# Altium schematic symbol library Game_Controller.SchLib: 17 symbols
Pins are listed as number, name and electrical type; pins without a type are passive.

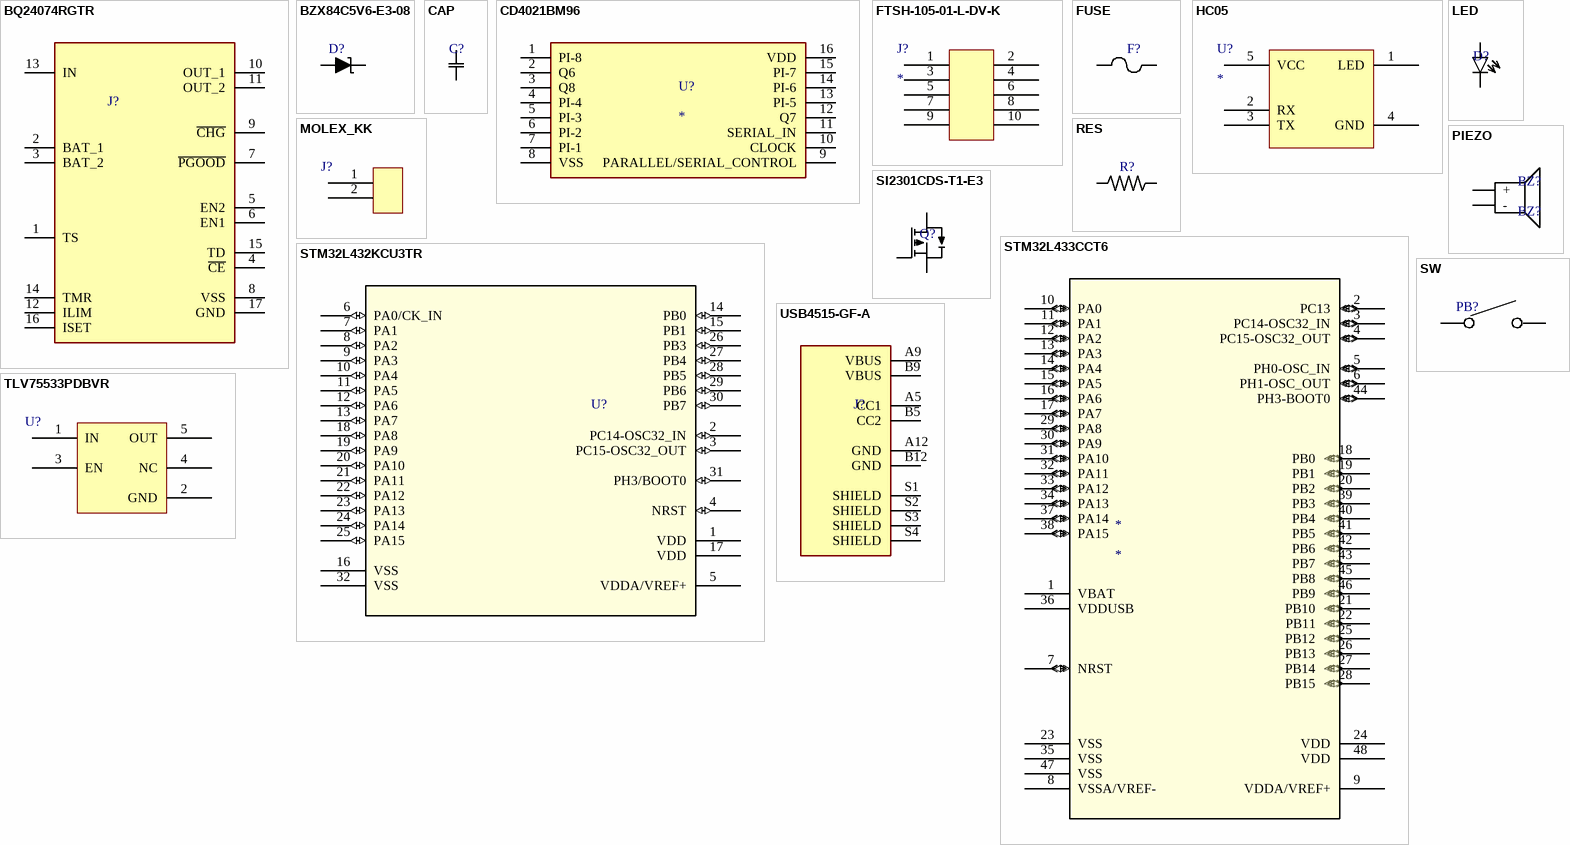
[diagram p0: symbols BQ24074RGTR to USB4515-GF-A]

## BQ24074RGTR
designator J?
footprint BQ24074RGTR
pins: 1 TS, 2 BAT_1, 3 BAT_2, 4 ~{CE}, 5 EN2, 6 EN1, 7 ~{PGOOD}, 8 VSS, 9 ~{CHG}, 10 OUT_1, 11 OUT_2, 12 ILIM, 13 IN, 14 TMR, 15 TD, 16 ISET, 17 GND

## BZX84C5V6-E3-08
designator D?
footprint SOT23-3 (SOT23, 3-Leads, Body 2.90x2.80mm, Pitch 0.95mm, IPC Medium Density)
pins: 1 A, 3 K

## CAP
designator C?
pins: 1, 2

## CD4021BM96
designator U?
footprint CD4021BM96
pins: 1 PI-8, 2 Q6, 3 Q8, 4 PI-4, 5 PI-3, 6 PI-2, 7 PI-1, 8 VSS, 9 PARALLEL/SERIAL_CONTROL, 10 CLOCK, 11 SERIAL_IN, 12 Q7, 13 PI-5, 14 PI-6, 15 PI-7, 16 VDD

## FTSH-105-01-L-DV-K
designator J?
pins: 1, 2, 3, 4, 5, 6, 7, 8, 9, 10

## FUSE
designator F?
pins: 1, 2

## HC05
designator U?
pins: 1 LED, 2 RX, 3 TX, 4 GND, 5 VCC

## LED
designator D?
pins: 1 A, 2 K

## MOLEX_KK
designator J?
pins: 1, 2

## PIEZO
designator BZ?, comment BZ?
pins: 1 +, 2 -

## RES
designator R?
pins: 1, 2

## SI2301CDS-T1-E3
designator Q?
footprint SOT23-3 (SOT23, 3-Leads, Body 2.90x2.80mm, Pitch 0.95mm, IPC Medium Density)
pins: 1 G, 2 S, 3 D

## STM32L432KCU3TR
designator U?
pins: 1 VDD (power), 2 PC14-OSC32_IN (io), 3 PC15-OSC32_OUT (io), 4 NRST (io), 5 VDDA/VREF+ (power), 6 PA0/CK_IN (io), 7 PA1 (io), 8 PA2 (io), 9 PA3 (io), 10 PA4 (io), 11 PA5 (io), 12 PA6 (io), 13 PA7 (io), 14 PB0 (io), 15 PB1 (io), 16 VSS (power), 17 VDD (power), 18 PA8 (io), 19 PA9 (io), 20 PA10 (io), 21 PA11 (io), 22 PA12 (io), 23 PA13 (io), 24 PA14 (io), 25 PA15 (io), 26 PB3 (io), 27 PB4 (io), 28 PB5 (io), 29 PB6 (io), 30 PB7 (io), 31 PH3/BOOT0 (io), 32 VSS (power)

## STM32L433CCT6
designator *
pins: 1 VBAT (power), 2 PC13 (io), 3 PC14-OSC32_IN (io), 4 PC15-OSC32_OUT (io), 5 PH0-OSC_IN (io), 6 PH1-OSC_OUT (io), 7 NRST (io), 8 VSSA/VREF- (power), 9 VDDA/VREF+ (power), 10 PA0 (io), 11 PA1 (io), 12 PA2 (io), 13 PA3 (io), 14 PA4 (io), 15 PA5 (io), 16 PA6 (io), 17 PA7 (io), 18 PB0 (io), 19 PB1 (io), 20 PB2 (io), 21 PB10 (io), 22 PB11 (io), 23 VSS (power), 24 VDD (power), 25 PB12 (io), 26 PB13 (io), 27 PB14 (io), 28 PB15 (io), 29 PA8 (io), 30 PA9 (io), 31 PA10 (io), 32 PA11 (io), 33 PA12 (io), 34 PA13 (io), 35 VSS (power), 36 VDDUSB (power), 37 PA14 (io), 38 PA15 (io), 39 PB3 (io), 40 PB4 (io), 41 PB5 (io), 42 PB6 (io), 43 PB7 (io), 44 PH3-BOOT0 (io), 45 PB8 (io), 46 PB9 (io), 47 VSS (power), 48 VDD (power)

## SW
designator PB?
pins: 1 0, 2 1

## TLV75533PDBVR
designator U?
pins: 1 IN, 2 GND, 3 EN, 4 NC, 5 OUT

## USB4515-GF-A
designator J?
footprint USBC_PD
pins: A5 CC1, A9 VBUS (power), A12 GND (power), B5 CC2, B9 VBUS (power), B12 GND (power), S1 SHIELD (power), S2 SHIELD (power), S3 SHIELD (power), S4 SHIELD (power)